# Altium footprint library Footprint_Vlad.PcbLib: 392 footprints (part 13 of 25)
Each footprint in its own frame and in the unit in brackets; x right, y up, seen from the top. Pads: shape width x height; smd on the part's side, far side on the other; paste and mask are expansions set on the pad; w line width, h text height; cw(c..) or ccw(c..) is an arc to the next point about the centre after c.
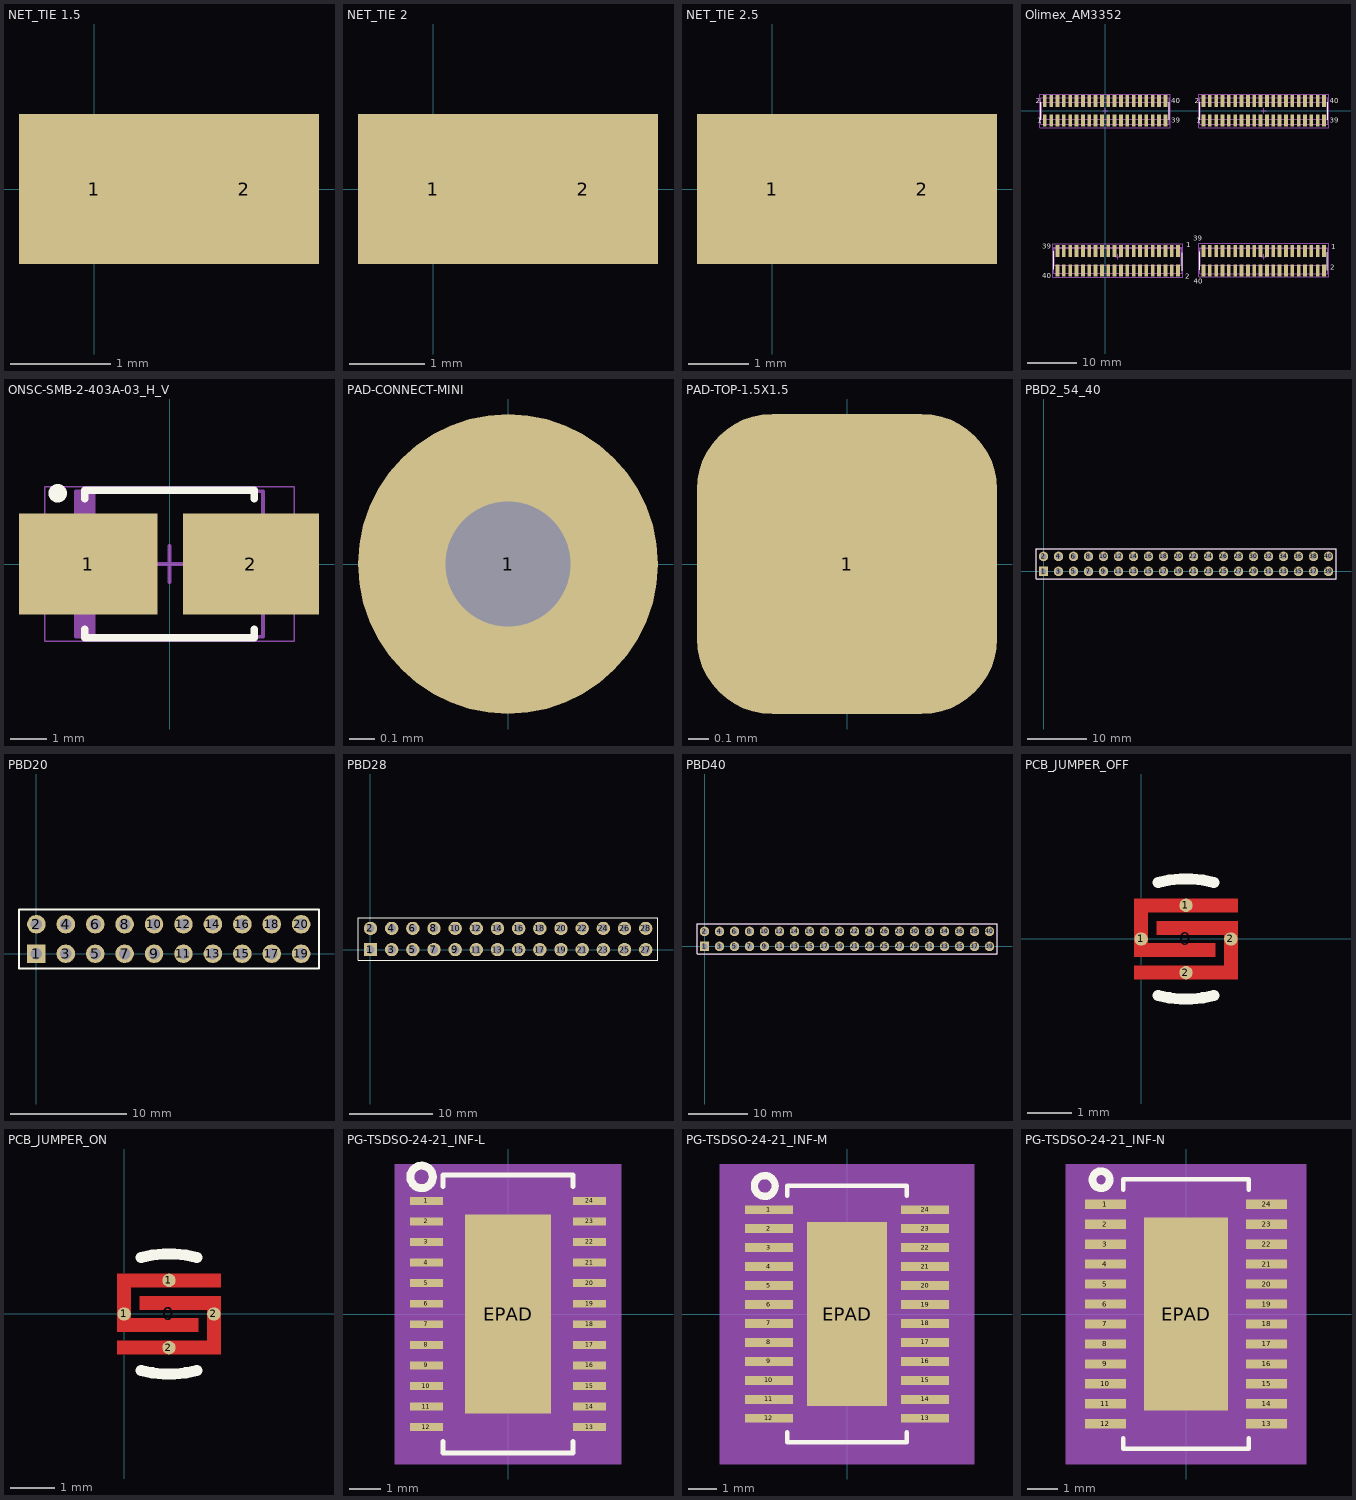
[diagram p12: the footprints below, top view; thin cyan lines are the x and y axes]

## NET_TIE 1.5 [mm] "Net Tie 1.5mm width"
pads (2):
  rect 1.5x1.5 smd paste-10 mask-10: 1(0,0) 2(1.5,0)

## NET_TIE 2 [mm] "Net Tie 2mm width"
pads (2):
  rect 2x2 smd paste-10 mask-10: 1(0,0)
  rect 2x2 smd paste-60 mask-60: 2(2,0)

## NET_TIE 2.5 [mm] "Net Tie 2.5mm width"
pads (2):
  rect 2.5x2.5 smd paste-10 mask-10: 1(0,0)
  rect 2.5x2.5 smd paste-60 mask-60: 2(2.5,0)

## Olimex_AM3352 [mm]
pads (160):
  rect 0.75x2.4 smd: 1(43.815,-28) 2(43.815,-31.9) 3(42.545,-28) 4(42.545,-31.9) 5(41.275,-28) 6(41.275,-31.9) 7(40.005,-28) 8(40.005,-31.9) 9(38.735,-28) 10(38.735,-31.9) 11(37.465,-28) 12(37.465,-31.9) 13(36.195,-28) 14(36.195,-31.9) 15(34.925,-28) 16(34.925,-31.9) 17(33.655,-28) 18(33.655,-31.9) 19(32.385,-28) 20(32.385,-31.9) 21(31.115,-28) 22(31.115,-31.9) 23(29.845,-28) 24(29.845,-31.9) 25(28.575,-28) 26(28.575,-31.9) 27(27.305,-28) 28(27.305,-31.9) 29(26.035,-28) 30(26.035,-31.9) 31(24.765,-28) 32(24.765,-31.9) 33(23.495,-28) 34(23.495,-31.9) 35(22.225,-28) 36(22.225,-31.9) 37(20.955,-28) 38(20.955,-31.9) 39(19.685,-28) 40(19.685,-31.9) 41(14.605,-28) 42(14.605,-31.9) 43(13.335,-28) 44(13.335,-31.9) 45(12.065,-28) 46(12.065,-31.9) 47(10.795,-28) 48(10.795,-31.9) 49(9.525,-28) 50(9.525,-31.9) 51(8.255,-28) 52(8.255,-31.9) 53(6.985,-28) 54(6.985,-31.9) 55(5.715,-28) 56(5.715,-31.9) 57(4.445,-28) 58(4.445,-31.9) 59(3.175,-28) 60(3.175,-31.9) 61(1.905,-28) 62(1.905,-31.9) 63(0.635,-28) 64(0.635,-31.9) 65(-0.635,-28) 66(-0.635,-31.9) 67(-1.905,-28) 68(-1.905,-31.9) 69(-3.175,-28) 70(-3.175,-31.9) 71(-4.445,-28) 72(-4.445,-31.9) 73(-5.715,-28) 74(-5.715,-31.9) 75(-6.985,-28) 76(-6.985,-31.9) 77(-8.255,-28) 78(-8.255,-31.9) 79(-9.525,-28) 80(-9.525,-31.9) 81(-12.065,-1.95) 82(-12.065,1.95) 83(-10.795,-1.95) 84(-10.795,1.95) 85(-9.525,-1.95) 86(-9.525,1.95) 87(-8.255,-1.95) 88(-8.255,1.95) 89(-6.985,-1.95) 90(-6.985,1.95) 91(-5.715,-1.95) 92(-5.715,1.95) 93(-4.445,-1.95) 94(-4.445,1.95) 95(-3.175,-1.95) 96(-3.175,1.95) 97(-1.905,-1.95) 98(-1.905,1.95) 99(-0.635,-1.95) 100(-0.635,1.95) 101(0.635,-1.95) 102(0.635,1.95) 103(1.905,-1.95) 104(1.905,1.95) 105(3.175,-1.95) 106(3.175,1.95) 107(4.445,-1.95) 108(4.445,1.95) 109(5.715,-1.95) 110(5.715,1.95) 111(6.985,-1.95) 112(6.985,1.95) 113(8.255,-1.95) 114(8.255,1.95) 115(9.525,-1.95) 116(9.525,1.95) 117(10.795,-1.95) 118(10.795,1.95) 119(12.065,-1.95) 120(12.065,1.95) 121(19.685,-1.95) 122(19.685,1.95) 123(20.955,-1.95) 124(20.955,1.95) 125(22.225,-1.95) 126(22.225,1.95) 127(23.495,-1.95) 128(23.495,1.95) 129(24.765,-1.95) 130(24.765,1.95) 131(26.035,-1.95) 132(26.035,1.95) 133(27.305,-1.95) 134(27.305,1.95) 135(28.575,-1.95) 136(28.575,1.95) 137(29.845,-1.95) 138(29.845,1.95) 139(31.115,-1.95) 140(31.115,1.95) 141(32.385,-1.95) 142(32.385,1.95) 143(33.655,-1.95) 144(33.655,1.95) 145(34.925,-1.95) 146(34.925,1.95) 147(36.195,-1.95) 148(36.195,1.95) 149(37.465,-1.95) 150(37.465,1.95) 151(38.735,-1.95) 152(38.735,1.95) 153(40.005,-1.95) 154(40.005,1.95) 155(41.275,-1.95) 156(41.275,1.95) 157(42.545,-1.95) 158(42.545,1.95) 159(43.815,-1.95) 160(43.815,1.95)
Top Overlay:
  lines w0.2: -12.85,-1.775 -12.85,1.775 ; -10.3,-31.65 -10.3,-28.1 ; 12.85,-1.775 12.85,1.775 ; 15.4,-31.95 15.4,-28.4 ; 18.9,-31.75 18.9,-28.2 ; 18.9,-1.775 18.9,1.775 ; 44.5,-31.85 44.5,-28.3 ; 44.6,-1.775 44.6,1.775
  text "40" at 13.23,1.5 h1
  text "39" at 13.23,-2.4 h1
  text "2" at -13.83,1.5 h1
  text "1" at -13.53,-2.4 h1
  text "1" at 18.22,-2.4 h1
  text "2" at 17.92,1.5 h1
  text "39" at 44.98,-2.4 h1
  text "40" at 44.98,1.5 h1
  text "1" at 45.212,-27.686 h1
  text "2" at 45.085,-31.75 h1
  text "39" at 17.6,-26 h1
  text "40" at 17.7,-34.6 h1
  text "1" at 16.2,-27.3 h1
  text "2" at 16,-33.6 h1
  text "39" at -12.573,-27.559 h1
  text "40" at -12.6,-33.5 h1
Mechanical 11:
  lines w0.1: -12.7,-1.7 12.7,-1.7 12.7,1.7 -12.7,1.7 -12.7,-1.7 ; -10.16,-30.91 -10.16,-27.51 15.24,-27.51 15.24,-30.91 -10.16,-30.91 ; 19.05,-30.91 19.05,-27.51 44.6,-27.51 44.6,-30.91 19.05,-30.91 ; 19.05,-1.7 19.05,1.7 44.45,1.7 44.45,-1.7 19.05,-1.7
Mechanical 13:
  lines w0.1: -12.85,-2.625 -12.85,2.625 12.85,2.625 12.85,-2.625 -12.85,-2.625 ; -10.3,-32.535 15.4,-32.535 15.4,-27.285 -10.3,-27.285 -10.3,-32.535 ; 18.9,-32.635 44.6,-32.635 44.6,-27.385 18.9,-27.385 18.9,-32.635 ; 18.9,-2.625 44.6,-2.625 44.6,2.625 18.9,2.625 18.9,-2.625
Mechanical 15:
  lines w0.1: -0.5,0 0.5,0 ; 0,-0.5 0,0.5 ; 2.04,-29.21 3.04,-29.21 ; 2.54,-29.71 2.54,-28.71 ; 31.25,-29.21 32.25,-29.21 ; 31.25,0 32.25,0 ; 31.75,-29.71 31.75,-28.71 ; 31.75,-0.5 31.75,0.5 ; -13.05,-3.35 13.05,-3.35 13.05,3.35 -13.05,3.35 -13.05,-3.35 ; -10.51,-33.26 -10.51,-26.56 15.59,-26.56 15.59,-33.26 -10.51,-33.26 ; 18.7,-33.175 18.7,-26.475 44.8,-26.475 44.8,-33.175 18.7,-33.175 ; 18.7,-3.35 18.7,3.35 44.8,3.35 44.8,-3.35 18.7,-3.35
3D body "62104021021 (rev1).stp": height 5.9, standoff -0.01, extent 19.05,-2.5 44.45,2.5
3D body "62104021021 (rev1).stp": height 5.9, standoff -0.01, extent 19.05,-32.45 44.45,-27.45
3D body "62104021021 (rev1).stp": height 5.9, standoff -0.01, extent -10.16,-32.45 15.24,-27.45
3D body "62104021021 (rev1).stp": height 5.9, standoff -0.01, extent -12.7,-2.5 12.7,2.5

## ONSC-SMB-2-403A-03_H_V [mm] "Molded, 2-Leads, Body 4.6x3.95mm"
height 2.42
pads (2):
  rect 3.759x2.743 smd: 1(-2.21,0)
  rect 3.7x2.743 smd: 2(2.21,0)
Top Overlay:
  circle w0.25: c-3.04,1.921 r0.125
  lines w0.2: -2.3,-1.772 -2.3,-2 2.3,-2 2.3,-1.772 ; -2.3,1.772 -2.3,2 2.3,2 2.3,1.772
Mechanical 13:
  rectangle: -2.54,-1.975 -2.011,1.975
  lines w0.1: -2.54,-1.975 -2.54,1.975 2.54,1.975 2.54,-1.975 -2.54,-1.975
Mechanical 15:
  lines w0.05: -3.39,-2.1 -3.39,2.1 3.39,2.1 3.39,-2.1 -3.39,-2.1
  lines w0.1: -0.5,0 0.5,0 ; 0,-0.5 0,0.5
3D body: height 2.42, standoff 0, extent -2.54,-1.975 2.54,1.975

## PAD-CONNECT-MINI [mm]
pads (1):
  round 1.2 hole 0.5: 1(0,0)

## PAD-TOP-1.5X1.5 [mm]
pads (1):
  rrect50% 1.5x1.5 smd: 1(0,0)

## PBD2_54_40 [mm]
pads (40):
  rect 1.6x1.6 hole 1: 1(0,0)
  round 1.6 hole 1: 2(0,2.54) 3(2.54,0) 4(2.54,2.54) 5(5.08,0) 6(5.08,2.54) 7(7.62,0) 8(7.62,2.54) 9(10.16,0) 10(10.16,2.54) 11(12.7,0) 12(12.7,2.54) 13(15.24,0) 14(15.24,2.54) 15(17.78,0) 16(17.78,2.54) 17(20.32,0) 18(20.32,2.54) 19(22.86,0) 20(22.86,2.54) 21(25.4,0) 22(25.4,2.54) 23(27.94,0) 24(27.94,2.54) 25(30.48,0) 26(30.48,2.54) 27(33.02,0) 28(33.02,2.54) 29(35.56,0) 30(35.56,2.54) 31(38.1,0) 32(38.1,2.54) 33(40.64,0) 34(40.64,2.54) 35(43.18,0) 36(43.18,2.54) 37(45.72,0) 38(45.72,2.54) 39(48.26,0) 40(48.26,2.54)
Top Overlay:
  lines w0.15: -1.27,-1.27 -1.27,3.81 49.53,3.81 49.53,-1.27 -1.27,-1.27
Mechanical 3:
  lines w0.1: -1.27,-1.295 49.53,-1.295 49.53,3.805 -1.27,3.805 -1.27,-1.295
3D body "User Library-PBD2_54-40.STEP": height 8.4, standoff -2.7, extent -1.263,-1.27 49.537,3.81

## PBD20 [mm]
pads (20):
  rect 1.6x1.6 hole 1: 1(0,0)
  round 1.6 hole 1: 2(0,2.54) 3(2.54,0) 4(2.54,2.54) 5(5.08,0) 6(5.08,2.54) 7(7.62,0) 8(7.62,2.54) 9(10.16,0) 10(10.16,2.54) 11(12.7,0) 12(12.7,2.54) 13(15.24,0) 14(15.24,2.54) 15(17.78,0) 16(17.78,2.54) 17(20.32,0) 18(20.32,2.54) 19(22.86,0) 20(22.86,2.54)
Top Overlay:
  lines w0.15: -1.5,-1.27 -1.5,3.81 24.4,3.81 24.4,-1.27 -1.5,-1.27
3D body "User Library-PBD_(DS1023-2)_2line_connectors_h=5_0_8_5mm_step_2_54mm (1).step": height 8.5, standoff -3, extent -1.52,-1.21 24.38,3.79

## PBD28 [mm]
pads (28):
  rect 1.6x1.6 hole 1: 1(0,0)
  round 1.6 hole 1: 2(0,2.54) 3(2.54,0) 4(2.54,2.54) 5(5.08,0) 6(5.08,2.54) 7(7.62,0) 8(7.62,2.54) 9(10.16,0) 10(10.16,2.54) 11(12.7,0) 12(12.7,2.54) 13(15.24,0) 14(15.24,2.54) 15(17.78,0) 16(17.78,2.54) 17(20.32,0) 18(20.32,2.54) 19(22.86,0) 20(22.86,2.54) 21(25.4,0) 22(25.4,2.54) 23(27.94,0) 24(27.94,2.54) 25(30.48,0) 26(30.48,2.54) 27(33.02,0) 28(33.02,2.54)
Top Overlay:
  lines w0.15: -1.5,-1.27 34.5,-1.27 34.5,3.81 -1.5,3.81 -1.5,-1.27
3D body "User Library-PBD_(DS1023-2)_2line_connectors_h=5_0_8_5mm_step_2_54mm.step": height 8.5, standoff -3, extent -1.52,-1.21 34.54,3.79

## PBD40 [mm]
pads (40):
  rect 1.6x1.6 hole 1: 1(0,0)
  round 1.6 hole 1: 2(0,2.54) 3(2.54,0) 4(2.54,2.54) 5(5.08,0) 6(5.08,2.54) 7(7.62,0) 8(7.62,2.54) 9(10.16,0) 10(10.16,2.54) 11(12.7,0) 12(12.7,2.54) 13(15.24,0) 14(15.24,2.54) 15(17.78,0) 16(17.78,2.54) 17(20.32,0) 18(20.32,2.54) 19(22.86,0) 20(22.86,2.54) 21(25.4,0) 22(25.4,2.54) 23(27.94,0) 24(27.94,2.54) 25(30.48,0) 26(30.48,2.54) 27(33.02,0) 28(33.02,2.54) 29(35.56,0) 30(35.56,2.54) 31(38.1,0) 32(38.1,2.54) 33(40.64,0) 34(40.64,2.54) 35(43.18,0) 36(43.18,2.54) 37(45.72,0) 38(45.72,2.54) 39(48.26,0) 40(48.26,2.54)
Top Overlay:
  lines w0.15: -1.27,-1.27 -1.27,3.81 49.53,3.81 49.53,-1.27 -1.27,-1.27
Mechanical 3:
  lines w0.1: -1.27,-1.295 49.53,-1.295 49.53,3.805 -1.27,3.805 -1.27,-1.295
3D body "User Library-PBD2_54-40.STEP": height 8.4, standoff -2.7, extent -1.263,-1.27 49.537,3.81

## PCB_JUMPER_OFF [mm] "soldable jumper OFF state"
pads (5):
  rect 2.5x2 on Top Solder: 0(1,0)
  round 0.3 smd paste-50 mask-50: 1(0,0) 1(1,0.75) 2(1,-0.75) 2(2,0)
Top Layer:
  region: 2.15,0.4 2.15,-0.9 -0.15,-0.9 -0.15,-0.6 1.85,-0.6 1.85,0.1 0.35,0.1 0.35,0.4
  region: -0.15,-0.4 -0.15,0.9 2.15,0.9 2.15,0.6 0.15,0.6 0.15,-0.1 1.65,-0.1 1.65,-0.4
Top Overlay:
  lines w0.25: 0.38,-1.257 ccw(c1,1) 1.62,-1.257 ; 0.384,1.258 cw(c1,-1) 1.616,1.258

## PCB_JUMPER_ON [mm] "soldable jumper ON state"
pads (6):
  rect 2.5x2 on Top Paste: 0(1,0)
  rect 2.5x2 on Top Solder: 0(1,0)
  round 0.3 smd paste-50 mask-50: 1(0,0) 1(1,0.75) 2(1,-0.75) 2(2,0)
Top Layer:
  region: 2.15,0.4 2.15,-0.9 -0.15,-0.9 -0.15,-0.6 1.85,-0.6 1.85,0.1 0.35,0.1 0.35,0.4
  region: -0.15,-0.4 -0.15,0.9 2.15,0.9 2.15,0.6 0.15,0.6 0.15,-0.1 1.65,-0.1 1.65,-0.4
Top Overlay:
  lines w0.25: 0.38,-1.257 ccw(c1,1) 1.62,-1.257 ; 0.384,1.258 cw(c1,-1) 1.616,1.258

## PG-TSDSO-24-21_INF-L [mil]
pads (25):
  rect 41.75x10 smd paste+0 mask+0: 1(-103.03,143) 2(-103.03,117) 3(-103.03,91) 4(-103.03,65) 5(-103.03,39) 6(-103.03,13) 7(-103.03,-13) 8(-103.03,-39) 9(-103.03,-65) 10(-103.03,-91) 11(-103.03,-117) 12(-103.03,-143) 13(103.03,-143) 14(103.03,-117) 15(103.03,-91) 16(103.03,-65) 17(103.03,-39) 18(103.03,-13) 19(103.03,13) 20(103.03,39) 21(103.03,65) 22(103.03,91) 23(103.03,117) 24(103.03,143)
  rect 109x252 smd paste-125.5 mask+0: EPAD(0,0)
Top Overlay:
  circle w10: c-109.19,173.2 r14.2
  lines w6: -82,-161.1 -82,-175.5 82,-175.5 82,-161.1 ; -82,161.1 -82,175.5 82,175.5 82,161.1
Top Paste:
  region: -3.94,122.06 -50.56,122.06 -50.56,79.54 -3.94,79.54
  region: -3.94,71.66 -50.56,71.66 -50.56,29.14 -3.94,29.14
  region: -3.94,21.26 -50.56,21.26 -50.56,-21.26 -3.94,-21.26
  region: -3.94,-29.14 -50.56,-29.14 -50.56,-71.66 -3.94,-71.66
  region: -3.94,-79.54 -50.56,-79.54 -50.56,-122.06 -3.94,-122.06
  region: 50.56,122.06 3.94,122.06 3.94,79.54 50.56,79.54
  region: 50.56,71.66 3.94,71.66 3.94,29.14 50.56,29.14
  region: 50.56,21.26 3.94,21.26 3.94,-21.26 50.56,-21.26
  region: 50.56,-29.14 3.94,-29.14 3.94,-71.66 50.56,-71.66
  region: 50.56,-79.54 3.94,-79.54 3.94,-122.06 50.56,-122.06
Assembly Bottom:
  region: 142.91,-189.5 -142.91,-189.5 -142.91,189.5 142.91,189.5
Mechanical 13:
  lines w0: -12,170.5 ccw(c0,170.5) 12,170.5
  lines w1: -118,-148 -118,-138 -77,-138 -77,-148 -118,-148 ; -118,-122 -118,-112 -77,-112 -77,-122 -118,-122 ; -118,-96 -118,-86 -77,-86 -77,-96 -118,-96 ; -118,-70 -118,-60 -77,-60 -77,-70 -118,-70 ; -118,-44 -118,-34 -77,-34 -77,-44 -118,-44 ; -118,-18 -118,-8 -77,-8 -77,-18 -118,-18 ; -118,8 -118,18 -77,18 -77,8 -118,8 ; -118,34 -118,44 -77,44 -77,34 -118,34 ; -118,60 -118,70 -77,70 -77,60 -118,60 ; -118,86 -118,96 -77,96 -77,86 -118,86 ; -118,112 -118,122 -77,122 -77,112 -118,112 ; -118,138 -118,148 -77,148 -77,138 -118,138 ; -77,-170.5 77,-170.5 77,170.5 -77,170.5 -77,-170.5 ; 77,-148 77,-138 118,-138 118,-148 77,-148 ; 77,-122 77,-112 118,-112 118,-122 77,-122 ; 77,-96 77,-86 118,-86 118,-96 77,-96 ; 77,-70 77,-60 118,-60 118,-70 77,-70 ; 77,-44 77,-34 118,-34 118,-44 77,-44 ; 77,-18 77,-8 118,-8 118,-18 77,-18 ; 77,8 77,18 118,18 118,8 77,8 ; 77,34 77,44 118,44 118,34 77,34 ; 77,60 77,70 118,70 118,60 77,60 ; 77,86 77,96 118,96 118,86 77,86 ; 77,112 77,122 118,122 118,112 77,112 ; 77,138 77,148 118,148 118,138 77,138
  text "*" at -74.5,117.5 h50
Mechanical 15:
  region: -81,-152 -127.91,-152 -127.91,152 -81,152 -81,174.5 81,174.5 81,152 127.91,152 127.91,-152 81,-152 81,-174.5 -81,-174.5
  lines w6: -127.91,-152 -127.91,152 -81,152 -81,174.5 81,174.5 81,152 127.91,152 127.91,-152 81,-152 81,-174.5 -81,-174.5 -81,-152 -127.91,-152
3D body "PG-TSDSO-24-21_INF.step": height 45.12, standoff 0, extent -117.99,-170.51 118,170.52

## PG-TSDSO-24-21_INF-M [mil]
pads (25):
  rect 65.37x11.97 smd paste+0 mask+0: 1(-106.97,143) 2(-106.97,117) 3(-106.97,91) 4(-106.97,65) 5(-106.97,39) 6(-106.97,13) 7(-106.97,-13) 8(-106.97,-39) 9(-106.97,-65) 10(-106.97,-91) 11(-106.97,-117) 12(-106.97,-143) 13(106.97,-143) 14(106.97,-117) 15(106.97,-91) 16(106.97,-65) 17(106.97,-39) 18(106.97,-13) 19(106.97,13) 20(106.97,39) 21(106.97,65) 22(106.97,91) 23(106.97,117) 24(106.97,143)
  rect 109x252 smd paste-125.5 mask+0: EPAD(0,0)
Top Overlay:
  circle w10: c-112.7,175.37 r14.2
  lines w6: -82,-162.08 -82,-175.5 82,-175.5 82,-162.08 ; -82,162.08 -82,175.5 82,175.5 82,162.08
Top Paste:
  region: -3.94,122.06 -50.56,122.06 -50.56,79.54 -3.94,79.54
  region: -3.94,71.66 -50.56,71.66 -50.56,29.14 -3.94,29.14
  region: -3.94,21.26 -50.56,21.26 -50.56,-21.26 -3.94,-21.26
  region: -3.94,-29.14 -50.56,-29.14 -50.56,-71.66 -3.94,-71.66
  region: -3.94,-79.54 -50.56,-79.54 -50.56,-122.06 -3.94,-122.06
  region: 50.56,122.06 3.94,122.06 3.94,79.54 50.56,79.54
  region: 50.56,71.66 3.94,71.66 3.94,29.14 50.56,29.14
  region: 50.56,21.26 3.94,21.26 3.94,-21.26 50.56,-21.26
  region: 50.56,-29.14 3.94,-29.14 3.94,-71.66 50.56,-71.66
  region: 50.56,-79.54 3.94,-79.54 3.94,-122.06 50.56,-122.06
Assembly Bottom:
  region: 174.65,-205.5 -174.65,-205.5 -174.65,205.5 174.65,205.5
Mechanical 13:
  lines w0: -12,170.5 ccw(c0,170.5) 12,170.5
  lines w1: -118,-148 -118,-138 -77,-138 -77,-148 -118,-148 ; -118,-122 -118,-112 -77,-112 -77,-122 -118,-122 ; -118,-96 -118,-86 -77,-86 -77,-96 -118,-96 ; -118,-70 -118,-60 -77,-60 -77,-70 -118,-70 ; -118,-44 -118,-34 -77,-34 -77,-44 -118,-44 ; -118,-18 -118,-8 -77,-8 -77,-18 -118,-18 ; -118,8 -118,18 -77,18 -77,8 -118,8 ; -118,34 -118,44 -77,44 -77,34 -118,34 ; -118,60 -118,70 -77,70 -77,60 -118,60 ; -118,86 -118,96 -77,96 -77,86 -118,86 ; -118,112 -118,122 -77,122 -77,112 -118,112 ; -118,138 -118,148 -77,148 -77,138 -118,138 ; -77,-170.5 77,-170.5 77,170.5 -77,170.5 -77,-170.5 ; 77,-148 77,-138 118,-138 118,-148 77,-148 ; 77,-122 77,-112 118,-112 118,-122 77,-122 ; 77,-96 77,-86 118,-86 118,-96 77,-96 ; 77,-70 77,-60 118,-60 118,-70 77,-70 ; 77,-44 77,-34 118,-34 118,-44 77,-44 ; 77,-18 77,-8 118,-8 118,-18 77,-18 ; 77,8 77,18 118,18 118,8 77,8 ; 77,34 77,44 118,44 118,34 77,34 ; 77,60 77,70 118,70 118,60 77,60 ; 77,86 77,96 118,96 118,86 77,86 ; 77,112 77,122 118,122 118,112 77,112 ; 77,138 77,148 118,148 118,138 77,138
  text "*" at -74.5,117.5 h50
Mechanical 15:
  region: -97,-168.98 -159.65,-168.98 -159.65,168.98 -97,168.98 -97,190.5 97,190.5 97,168.98 159.65,168.98 159.65,-168.98 97,-168.98 97,-190.5 -97,-190.5
  lines w6: -159.65,-168.98 -159.65,168.98 -97,168.98 -97,190.5 97,190.5 97,168.98 159.65,168.98 159.65,-168.98 97,-168.98 97,-190.5 -97,-190.5 -97,-168.98 -159.65,-168.98
3D body "PG-TSDSO-24-21_INF.step": height 45.12, standoff 0, extent -117.99,-170.51 118,170.52

## PG-TSDSO-24-21_INF-N [mil]
pads (25):
  rect 53.56x11.97 smd paste+0 mask+0: 1(-105,143) 2(-105,117) 3(-105,91) 4(-105,65) 5(-105,39) 6(-105,13) 7(-105,-13) 8(-105,-39) 9(-105,-65) 10(-105,-91) 11(-105,-117) 12(-105,-143) 13(105,-143) 14(105,-117) 15(105,-91) 16(105,-65) 17(105,-39) 18(105,-13) 19(105,13) 20(105,39) 21(105,65) 22(105,91) 23(105,117) 24(105,143)
  rect 109x252 smd paste-125.5 mask+0: EPAD(0,0)
Top Overlay:
  circle w10: c-110.71,174.99 r11.14
  lines w6: -82,-162.08 -82,-175.5 82,-175.5 82,-162.08 ; -82,162.08 -82,175.5 82,175.5 82,162.08
Top Paste:
  region: -3.94,122.06 -50.56,122.06 -50.56,79.54 -3.94,79.54
  region: -3.94,71.66 -50.56,71.66 -50.56,29.14 -3.94,29.14
  region: -3.94,21.26 -50.56,21.26 -50.56,-21.26 -3.94,-21.26
  region: -3.94,-29.14 -50.56,-29.14 -50.56,-71.66 -3.94,-71.66
  region: -3.94,-79.54 -50.56,-79.54 -50.56,-122.06 -3.94,-122.06
  region: 50.56,122.06 3.94,122.06 3.94,79.54 50.56,79.54
  region: 50.56,71.66 3.94,71.66 3.94,29.14 50.56,29.14
  region: 50.56,21.26 3.94,21.26 3.94,-21.26 50.56,-21.26
  region: 50.56,-29.14 3.94,-29.14 3.94,-71.66 50.56,-71.66
  region: 50.56,-79.54 3.94,-79.54 3.94,-122.06 50.56,-122.06
Assembly Bottom:
  region: 156.78,-195.5 -156.78,-195.5 -156.78,195.5 156.78,195.5
Mechanical 13:
  lines w0: -12,170.5 ccw(c0,170.5) 12,170.5
  lines w1: -118,-148 -118,-138 -77,-138 -77,-148 -118,-148 ; -118,-122 -118,-112 -77,-112 -77,-122 -118,-122 ; -118,-96 -118,-86 -77,-86 -77,-96 -118,-96 ; -118,-70 -118,-60 -77,-60 -77,-70 -118,-70 ; -118,-44 -118,-34 -77,-34 -77,-44 -118,-44 ; -118,-18 -118,-8 -77,-8 -77,-18 -118,-18 ; -118,8 -118,18 -77,18 -77,8 -118,8 ; -118,34 -118,44 -77,44 -77,34 -118,34 ; -118,60 -118,70 -77,70 -77,60 -118,60 ; -118,86 -118,96 -77,96 -77,86 -118,86 ; -118,112 -118,122 -77,122 -77,112 -118,112 ; -118,138 -118,148 -77,148 -77,138 -118,138 ; -77,-170.5 77,-170.5 77,170.5 -77,170.5 -77,-170.5 ; 77,-148 77,-138 118,-138 118,-148 77,-148 ; 77,-122 77,-112 118,-112 118,-122 77,-122 ; 77,-96 77,-86 118,-86 118,-96 77,-96 ; 77,-70 77,-60 118,-60 118,-70 77,-70 ; 77,-44 77,-34 118,-34 118,-44 77,-44 ; 77,-18 77,-8 118,-8 118,-18 77,-18 ; 77,8 77,18 118,18 118,8 77,8 ; 77,34 77,44 118,44 118,34 77,34 ; 77,60 77,70 118,70 118,60 77,60 ; 77,86 77,96 118,96 118,86 77,86 ; 77,112 77,122 118,122 118,112 77,112 ; 77,138 77,148 118,148 118,138 77,138
  text "*" at -74.5,117.5 h50
Mechanical 15:
  region: -87,-158.98 -141.78,-158.98 -141.78,158.98 -87,158.98 -87,180.5 87,180.5 87,158.98 141.78,158.98 141.78,-158.98 87,-158.98 87,-180.5 -87,-180.5
  lines w6: -141.78,-158.98 -141.78,158.98 -87,158.98 -87,180.5 87,180.5 87,158.98 141.78,158.98 141.78,-158.98 87,-158.98 87,-180.5 -87,-180.5 -87,-158.98 -141.78,-158.98
3D body "PG-TSDSO-24-21_INF.step": height 45.12, standoff 0, extent -117.99,-170.51 118,170.52